# Altium footprint library Count-.PcbLib: 34 footprints (part 3 of 3)
Each footprint in its own frame and in the unit in brackets; x right, y up, seen from the top. Pads: shape width x height; smd on the part's side, far side on the other; paste and mask are expansions set on the pad; w line width, h text height; cw(c..) or ccw(c..) is an arc to the next point about the centre after c.
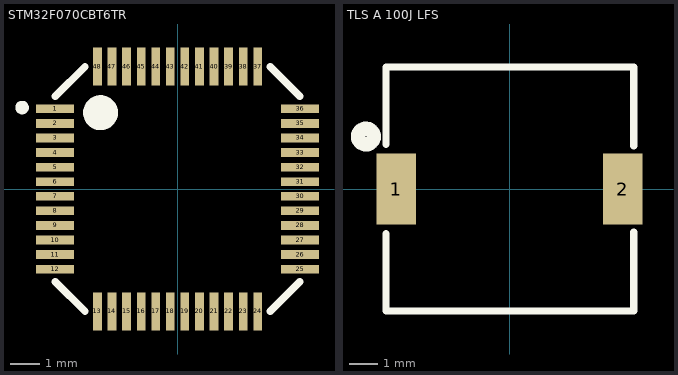
[diagram p2: the footprints below, top view; thin cyan lines are the x and y axes]

## STM32F070CBT6TR [mm]
pads (48):
  rect 1.3x0.3 smd: 1(-4.2,2.75) 2(-4.2,2.25) 3(-4.2,1.75) 4(-4.2,1.25) 5(-4.2,0.75) 6(-4.2,0.25) 7(-4.2,-0.25) 8(-4.2,-0.75) 9(-4.2,-1.25) 10(-4.2,-1.75) 11(-4.2,-2.25) 12(-4.2,-2.75) 25(4.2,-2.75) 26(4.2,-2.25) 27(4.2,-1.75) 28(4.2,-1.25) 29(4.2,-0.75) 30(4.2,-0.25) 31(4.2,0.25) 32(4.2,0.75) 33(4.2,1.25) 34(4.2,1.75) 35(4.2,2.25) 36(4.2,2.75)
  rect 0.3x1.3 smd: 13(-2.75,-4.2) 14(-2.25,-4.2) 15(-1.75,-4.2) 16(-1.25,-4.2) 17(-0.75,-4.2) 18(-0.25,-4.2) 19(0.25,-4.2) 20(0.75,-4.2) 21(1.25,-4.2) 22(1.75,-4.2) 23(2.25,-4.2) 24(2.75,-4.2) 37(2.75,4.2) 38(2.25,4.2) 39(1.75,4.2) 40(1.25,4.2) 41(0.75,4.2) 42(0.25,4.2) 43(-0.25,4.2) 44(-0.75,4.2) 45(-1.25,4.2) 46(-1.75,4.2) 47(-2.25,4.2) 48(-2.75,4.2)
Top Overlay:
  circle w0.6: c-2.642,2.616 r0.3
  circle w0.254: c-5.334,2.794 r0.105
  lines w0.254: -4.191,-3.175 -3.175,-4.191 ; -4.191,3.175 -3.175,4.191 ; 3.175,-4.191 4.191,-3.175 ; 3.175,4.191 4.191,3.175
3D body "User Library-TQFP-48.STEP": height 1.39, standoff -0.07, extent -4.496,-4.504 4.504,4.496

## TLS A 100J LFS [mm]
pads (2):
  rect 1.4x2.5 smd: 1(-4,0) 2(4,0)
Top Overlay:
  circle w0.5: c-5.08,1.854 r0.279
  lines w0.254: -4.369,-1.575 -4.369,-4.318 4.394,-4.318 4.394,-1.524 ; -4.369,1.575 -4.369,4.318 4.394,4.318 4.394,1.524
3D body "TLSA100JLFS.stp": height 3.95, standoff 0, extent -4.291,-4.2 4.291,4.2